# Altium schematic symbol library DMN2028UFU-7.SchLib: 1 symbol
Pins are listed as number, name and electrical type; pins without a type are passive.

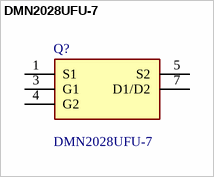
[diagram p0: symbol DMN2028UFU-7]

## DMN2028UFU-7
designator Q?
MOSFET N-Ch Enh Mode FET 20Vdss 10Vgss 40A; Manufacturer_Name: Diodes Incorporated; Geometry.Height: 0.65mm; Mouser Part Number: 621-DMN2028UFU-7; Mouser Price/Stock: https://www.mouser.co.uk/ProductDetail/Diodes-Incorporated/DMN2028UFU-7?qs=MNIFWdyJgboGsRP6KB2Mmw%3D%3D; Manufacturer_Part_Number: DMN2028UFU-7; Datasheet Link: https://www.diodes.com/assets/Datasheets/DMN2028UFU.pdf
footprint DMN2028UFU7
pins: 1 S1, 3 G1, 4 G2, 5 S2, 7 D1/D2